# Altium footprint library DATALOGER_RevA.PcbLib: 37 footprints (part 1 of 3)
Each footprint in its own frame and in the unit in brackets; x right, y up, seen from the top. Pads: shape width x height; smd on the part's side, far side on the other; paste and mask are expansions set on the pad; w line width, h text height; cw(c..) or ccw(c..) is an arc to the next point about the centre after c.
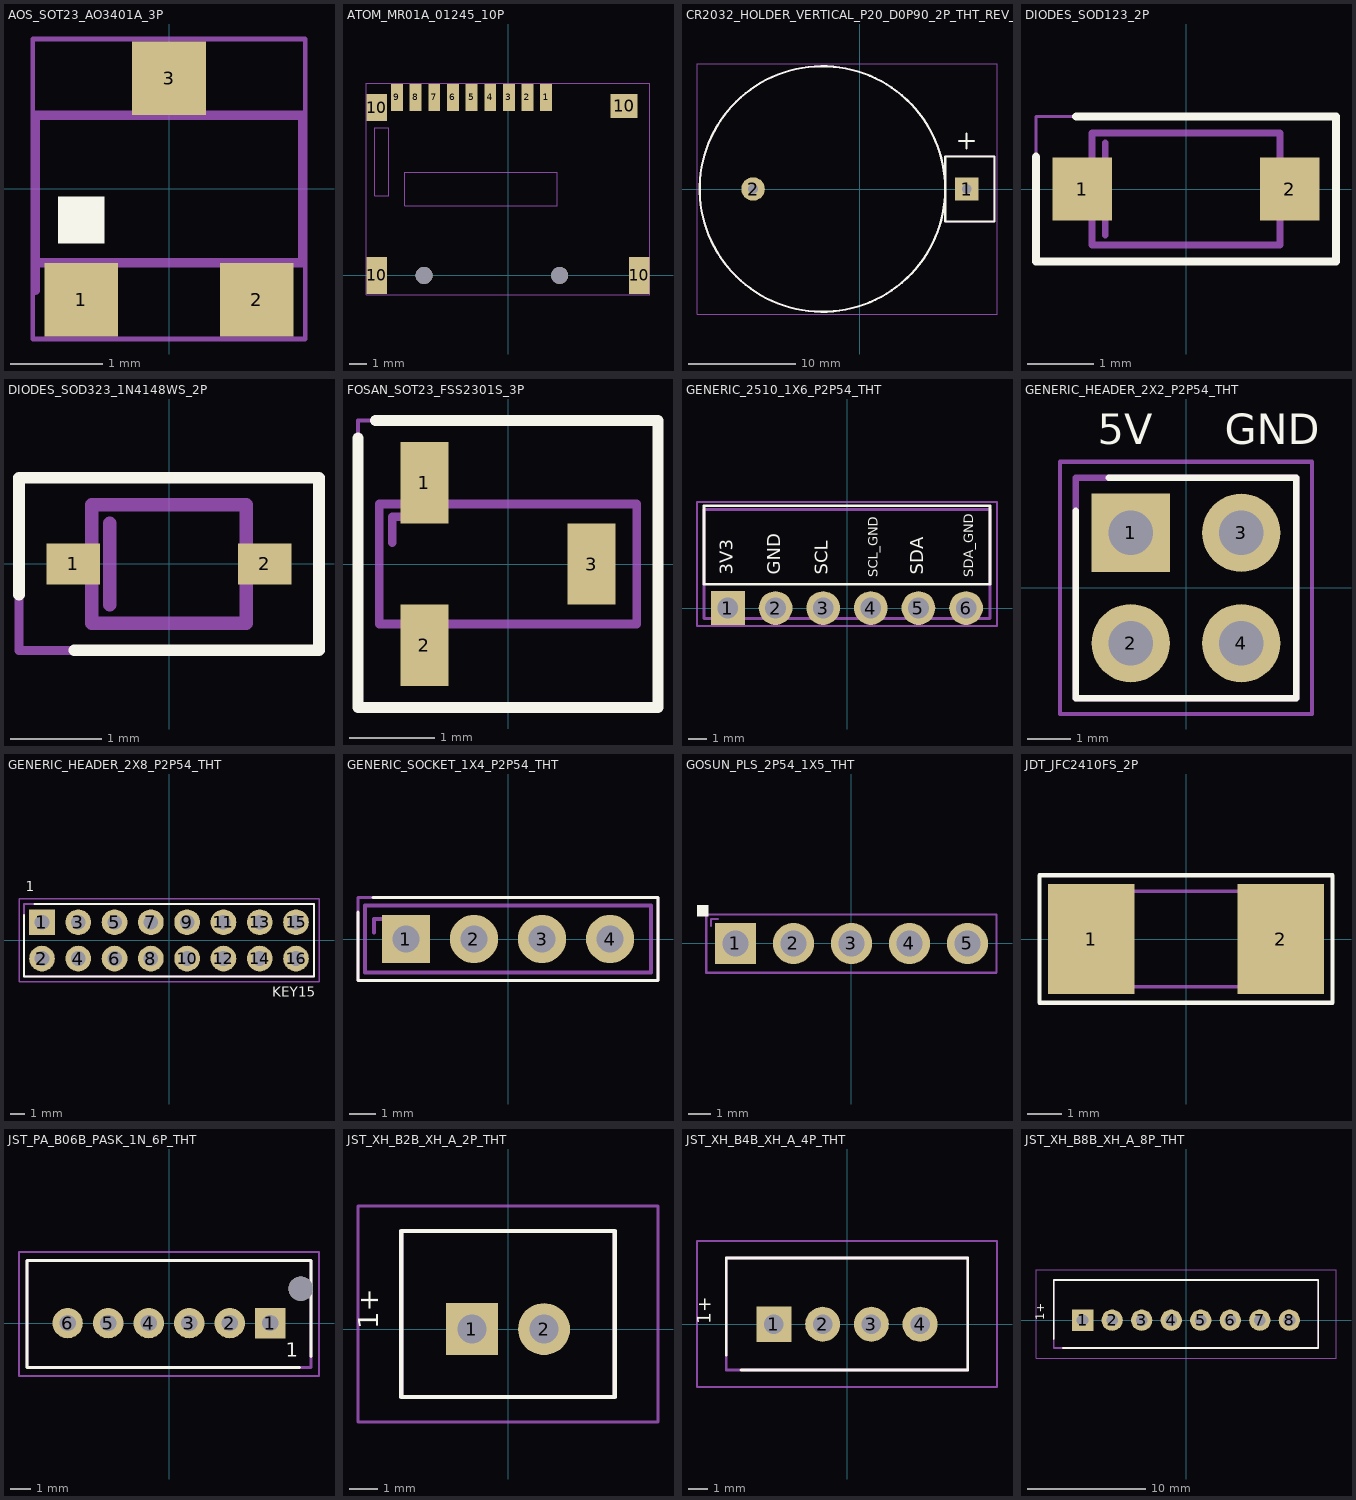
[diagram p0: the footprints below, top view; thin cyan lines are the x and y axes]

## AOS_SOT23_AO3401A_3P [mm] "AOS AO3401A SOT23"
pads (3):
  rect 0.8x0.8 smd paste+0: 1(-0.95,-1.2) 2(0.95,-1.2) 3(0,1.2)
Top Overlay:
  region: -0.696,-0.59 -0.696,-0.082 -1.204,-0.082 -1.204,-0.59
Mechanical 1:
  lines w0.1: -1.45,-1.1 -1.45,-0.8 ; -1.15,-0.8 -1.45,-0.8 ; -1.45,-0.8 1.45,-0.8 1.45,0.8 -1.45,0.8 -1.45,-0.8
Top Courtyard:
  lines w0.05: -1.475,-1.625 -1.475,1.625 1.475,1.625 1.475,-1.625 -1.475,-1.625

## ATOM_MR01A_01245_10P [mm] "ATOM MR01A-01245 microSD socket"
pads (15):
  rect 0.7x1.6 smd paste+0: 1(2.25,10.5) 2(1.15,10.5) 3(0.05,10.5) 4(-1.05,10.5) 5(-2.15,10.5) 6(-3.25,10.5) 7(-4.35,10.5) 8(-5.45,10.5) 9(-6.55,10.5)
  rect 1.2x2.2 smd paste+0: 10(-7.75,0) 10(7.75,0)
  rect 1.2x1.6 smd paste+0: 10(-7.75,9.9)
  rect 1.6x1.4 smd paste+0: 10(6.85,10)
  shape4 1x1 hole 1 unplated: ""(-4.95,0) ""(3.05,0)
Top Courtyard:
  lines w0.05: -8.375,-1.125 8.375,-1.125 8.375,11.325 -8.375,11.325 -8.375,-1.125
Mechanical 3:
  lines w0.05: -7.85,4.7 -7.05,4.7 -7.05,8.7 -7.85,8.7 -7.85,4.7 ; -6.1,4.1 2.9,4.1 2.9,6.1 -6.1,6.1 -6.1,4.1

## CR2032_HOLDER_VERTICAL_P20_D0P90_2P_THT_REV_B [mm] "CR2032 vertical THT holder Rev-B candidate"
height 7.6
pads (2):
  rect 2.2x2.2 hole 0.9 paste-2539.97: 1(10,0)
  round 2.2 hole 0.9 paste-2539.97: 2(-10,0)
Top Overlay:
  circle w0.2: c-3.5,0 r11.5
  lines w0.2: 9.3,4.5 10.7,4.5 ; 10,3.8 10,5.2 ; 8,-3.05 8,3.05 12.6,3.05 12.6,-3.05 8,-3.05
Mechanical 1:
  circle w0.15: c-3.5,0 r11.5
  lines w0.15: 8,-3.05 8,3.05 12.6,3.05 12.6,-3.05 8,-3.05
Top Courtyard:
  lines w0.1: -15.25,-11.75 12.85,-11.75 12.85,11.75 -15.25,11.75 -15.25,-11.75

## DIODES_SOD123_2P [mm] "Datalogger Rev-A G007"
pads (2):
  rect 0.9x0.95 smd paste+0: 1(-1.575,0) 2(1.575,0)
Top Overlay:
  lines w0.127: -2.275,0.49 -2.275,-1.1 2.275,-1.1 2.275,1.1 -1.665,1.1
Mechanical 1:
  lines w0.1: -1.225,-0.7 -1.225,0.7 ; -1.425,-0.85 -1.425,0.85 1.425,0.85 1.425,-0.85 -1.425,-0.85
Top Courtyard:
  lines w0.05: -2.275,-1.1 -2.275,1.1 2.275,1.1 2.275,-1.1 -2.275,-1.1

## DIODES_SOD323_1N4148WS_2P [mm] "1N4148WS SOD323"
pads (2):
  rect 0.59x0.45 smd paste+0: 1(-1.055,0) 2(1.055,0)
Top Overlay:
  lines w0.127: -1.65,-0.34 -1.65,0.95 1.65,0.95 1.65,-0.95 -1.04,-0.95
Mechanical 1:
  lines w0.15: -0.65,-0.45 -0.65,0.45 ; -0.85,-0.65 0.85,-0.65 0.85,0.65 -0.85,0.65 -0.85,-0.65
Top Courtyard:
  lines w0.1: -1.65,-0.95 1.65,-0.95 1.65,0.95 -1.65,0.95 -1.65,-0.95

## FOSAN_SOT23_FSS2301S_3P [mm] "Datalogger Rev-A G008"
pads (3):
  rect 0.56x0.95 smd paste+0: 1(-0.975,0.95) 2(-0.975,-0.95) 3(0.975,0)
Top Overlay:
  lines w0.127: -1.75,1.472 -1.75,-1.675 1.75,-1.675 1.75,1.675 -1.547,1.675
Mechanical 1:
  lines w0.1: -1.35,0.25 -1.35,0.55 -1.05,0.55 ; -1.5,-0.7 -1.5,0.7 1.5,0.7 1.5,-0.7 -1.5,-0.7
Top Courtyard:
  lines w0.05: -1.75,-1.675 -1.75,1.675 1.75,1.675 1.75,-1.675 -1.75,-1.675

## GENERIC_2510_1X6_P2P54_THT [mm] "Generic 2510-style 1x6 straight male THT PCB harness header"
pads (6):
  rect 1.8x1.8 hole 1.1 paste-2539.97: 1(-6.35,0)
  round 1.8 hole 1.1 paste-2539.97: 2(-3.81,0) 3(-1.27,0) 4(1.27,0) 5(3.81,0) 6(6.35,0)
Top Overlay:
  lines w0.15: -7.62,1.27 -7.62,5.461 7.62,5.461 7.62,1.27 -7.62,1.27
  text "SDA_GND" at 6.731,1.651 h0.51
  text "SDA" at 4.064,1.778 h0.7
  text "SCL_GND" at 1.651,1.651 h0.51
  text "SCL" at -1.016,1.778 h0.7
  text "GND" at -3.556,1.778 h0.7
  text "3V3" at -6.096,1.778 h0.7
Mechanical 1:
  lines w0.15: -7.62,-0.55 -7.62,5.25 7.62,5.25 7.62,-0.55 -7.62,-0.55
Top Courtyard:
  lines w0.1: -8,-0.95 -8,5.65 8,5.65 8,-0.95 -8,-0.95

## GENERIC_HEADER_2X2_P2P54_THT [mm] "Generic 2x2 vertical male THT header"
pads (4):
  rect 1.8x1.8 hole 1.02 paste-2539.97: 1(-1.27,1.27)
  round 1.8 hole 1.02 paste-2539.97: 2(-1.27,-1.27) 3(1.27,1.27) 4(1.27,-1.27)
Top Overlay:
  lines w0.15: -2.54,1.778 -2.54,-2.54 2.54,-2.54 2.54,2.54 -1.778,2.54
  text "GND" at 0.889,3.302 h0.7
  text "5V" at -2.032,3.302 h0.7
Mechanical 1:
  lines w0.15: -2.54,-2.54 -2.54,2.54 2.54,2.54 2.54,-2.54 -2.54,-2.54
Top Courtyard:
  lines w0.1: -2.9,-2.9 -2.9,2.9 2.9,2.9 2.9,-2.9 -2.9,-2.9

## GENERIC_HEADER_2X8_P2P54_THT [mm] "Generic 2x8 vertical male THT header"
pads (16):
  rect 1.8x1.8 hole 1.02 paste-2539.97: 1(-8.89,1.27)
  round 1.8 hole 1.02 paste-2539.97: 2(-8.89,-1.27) 3(-6.35,1.27) 4(-6.35,-1.27) 5(-3.81,1.27) 6(-3.81,-1.27) 7(-1.27,1.27) 8(-1.27,-1.27) 9(1.27,1.27) 10(1.27,-1.27) 11(3.81,1.27) 12(3.81,-1.27) 13(6.35,1.27) 14(6.35,-1.27) 15(8.89,1.27) 16(8.89,-1.27)
Top Overlay:
  lines w0.15: -10.16,1.778 -10.16,-2.54 10.16,-2.54 10.16,2.54 -9.398,2.54
  text "KEY15" at 7.239,-3.937 h0.7
  text "1" at -10.033,3.429 h0.7
Mechanical 1:
  lines w0.15: -10.16,-2.54 -10.16,2.54 10.16,2.54 10.16,-2.54 -10.16,-2.54
Top Courtyard:
  lines w0.1: -10.5,-2.9 -10.5,2.9 10.5,2.9 10.5,-2.9 -10.5,-2.9

## GENERIC_SOCKET_1X4_P2P54_THT [mm] "Generic 1x4 straight female THT socket"
pads (4):
  rect 1.8x1.8 hole 1.02 paste-2539.97: 1(-3.81,0)
  round 1.8 hole 1.02 paste-2539.97: 2(-1.27,0) 3(1.27,0) 4(3.81,0)
Top Overlay:
  lines w0.127: -5.6,0.991 -5.6,-1.55 5.6,-1.55 5.6,1.55 -5.041,1.55
Mechanical 1:
  lines w0.15: -5,0.25 -5,0.75 -4.5,0.75 ; -5.33,-1.25 -5.33,1.25 5.33,1.25 5.33,-1.25 -5.33,-1.25
Top Courtyard:
  lines w0.1: -5.6,-1.55 -5.6,1.55 5.6,1.55 5.6,-1.55 -5.6,-1.55

## GOSUN_PLS_2P54_1X5_THT [mm] "Gosun PLS 2.54 1x5 cut from 1x40 stock"
pads (5):
  rect 1.8x1.8 hole 1.15: 1(-5.08,0)
  round 1.8 hole 1.15: 2(-2.54,0) 3(0,0) 4(2.54,0) 5(5.08,0)
Top Overlay:
  region: -6.763,1.683 -6.763,1.175 -6.255,1.175 -6.255,1.683
Mechanical 1:
  lines w0.1: -6.15,0.77 -6.15,1.07 -5.85,1.07 ; -6.35,-1.27 6.35,-1.27 6.35,1.27 -6.35,1.27 -6.35,-1.27
Top Courtyard:
  lines w0.05: -6.375,-1.295 6.375,-1.295 6.375,1.295 -6.375,1.295 -6.375,-1.295

## JDT_JFC2410FS_2P [mm] "Datalogger Rev-A G003"
pads (2):
  rect 2.5x3.2 smd paste+0: 1(-2.75,0) 2(2.75,0)
Top Overlay:
  lines w0.127: -4.25,-1.85 4.25,-1.85 4.25,1.85 -4.25,1.85 -4.25,-1.85
Mechanical 1:
  lines w0.1: -3.24,-1.39 -3.24,1.39 3.24,1.39 3.24,-1.39 -3.24,-1.39
Top Courtyard:
  lines w0.05: -4.25,-1.85 -4.25,1.85 4.25,1.85 4.25,-1.85 -4.25,-1.85

## JST_PA_B06B_PASK_1N_6P_THT [mm] "JST PA B06B-PASK-1N"
pads (7):
  rect 1.5x1.5 hole 0.8 paste-2539.97: 1(5,0)
  round 1.5 hole 0.8 paste-2539.97: 2(3,0) 3(1,0) 4(-1,0) 5(-3,0) 6(-5,0)
  round 1.2 hole 1.2 unplated paste-2539.97: ""(6.5,1.7)
Top Overlay:
  lines w0.15: 6.441,-2.2 -7,-2.2 -7,3.1 7,3.1 7,-1.641
  text "1" at 5.762,-1.651 h0.7
Mechanical 1:
  lines w0.15: -7,-2.2 7,-2.2 7,3.1 -7,3.1 -7,-2.2
Top Courtyard:
  lines w0.1: -7.4,-2.6 7.4,-2.6 7.4,3.5 -7.4,3.5 -7.4,-2.6

## JST_XH_B2B_XH_A_2P_THT [mm] "JST XH B2B-XH-A top-entry THT"
pads (2):
  rect 1.8x1.8 hole 1 paste-2539.97: 1(-1.25,0)
  round 1.8 hole 1 paste-2539.97: 2(1.25,0)
Top Overlay:
  lines w0.15: -3.7,-2.35 -3.7,3.4 3.7,3.4 3.7,-2.35 -3.7,-2.35
  text "1+" at -4.5,0 h0.7
  text ".Designator" at 0,4.6 h0.9
Mechanical 1:
  lines w0.15: -3.7,-2.35 -3.7,3.4 3.7,3.4 3.7,-2.35 -3.7,-2.35
Top Courtyard:
  lines w0.1: -5.2,-3.225 -5.2,4.275 5.2,4.275 5.2,-3.225 -5.2,-3.225

## JST_XH_B4B_XH_A_4P_THT [mm] "JST XH B4B-XH-A top-entry THT"
pads (4):
  rect 1.8x1.8 hole 1 paste-2539.97: 1(-3.75,0)
  round 1.8 hole 1 paste-2539.97: 2(-1.25,0) 3(1.25,0) 4(3.75,0)
Top Overlay:
  lines w0.15: -6.2,-1.588 -6.2,3.4 6.2,3.4 6.2,-2.35 -5.438,-2.35
  text ".Designator" at 0,4.6 h0.9
  text "1+" at -7,0 h0.7
Mechanical 1:
  lines w0.15: -6.2,-2.35 6.2,-2.35 6.2,3.4 -6.2,3.4 -6.2,-2.35
Top Courtyard:
  lines w0.1: -7.7,-3.225 7.7,-3.225 7.7,4.275 -7.7,4.275 -7.7,-3.225

## JST_XH_B8B_XH_A_8P_THT [mm] "JST XH B8B-XH-A top-entry THT"
pads (8):
  rect 1.8x1.8 hole 1 paste-2539.97: 1(-8.75,0)
  round 1.8 hole 1 paste-2539.97: 2(-6.25,0) 3(-3.75,0) 4(-1.25,0) 5(1.25,0) 6(3.75,0) 7(6.25,0) 8(8.75,0)
Top Overlay:
  lines w0.15: -11.2,-1.588 -11.2,3.4 11.2,3.4 11.2,-2.35 -10.438,-2.35
  text ".Designator" at 0,4.6 h0.9
  text "1+" at -12,0 h0.7
Mechanical 1:
  lines w0.15: -11.2,-2.35 11.2,-2.35 11.2,3.4 -11.2,3.4 -11.2,-2.35
Top Courtyard:
  lines w0.1: -12.7,-3.225 12.7,-3.225 12.7,4.275 -12.7,4.275 -12.7,-3.225